# Altium footprint library SB0037A.PcbLib: 74 footprints (part 2 of 5)
Each footprint in its own frame and in the unit in brackets; x right, y up, seen from the top. Pads: shape width x height; smd on the part's side, far side on the other; paste and mask are expansions set on the pad; w line width, h text height; cw(c..) or ccw(c..) is an arc to the next point about the centre after c.
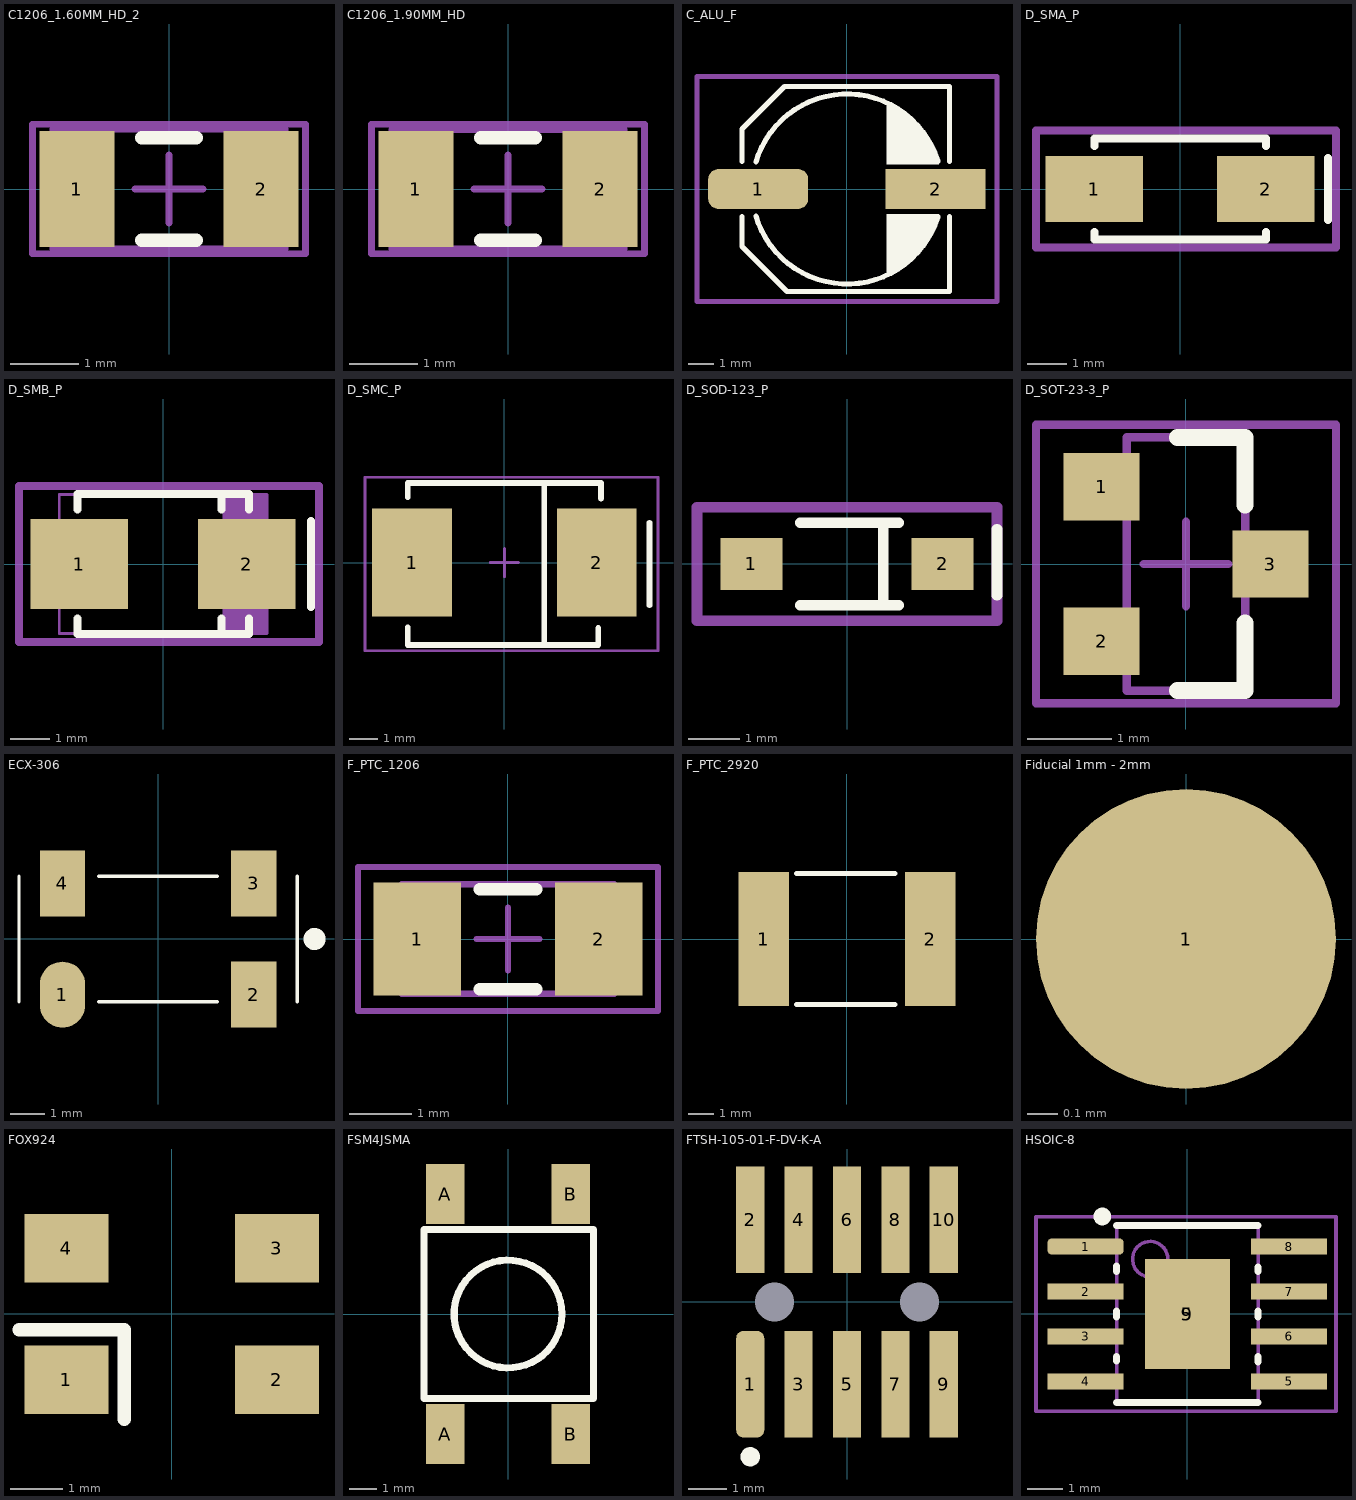
[diagram p1: the footprints below, top view; thin cyan lines are the x and y axes]

## C1206_1.60MM_HD_2 [mm]
pads (2):
  rect 1.1x1.7 smd: 1(-1.35,0) 2(1.35,0)
Top Overlay:
  lines w0.2: -0.4,-0.75 0.4,-0.75 ; -0.4,0.75 0.4,0.75
Mechanical 13:
  lines w0.1: -1.7,-0.875 1.7,-0.875 1.7,0.875 -1.7,0.875 -1.7,-0.875
Mechanical 15:
  lines w0.1: -0.5,0 0.5,0 ; 0,-0.5 0,0.5 ; -2,-0.95 2,-0.95 2,0.95 -2,0.95 -2,-0.95
3D body "1206_1.60mm.STEP": height 1.6, standoff 0, extent -1.6,-0.8 1.6,0.8

## C1206_1.90MM_HD [mm] "Capacitor - 1206 - High Density"
height 1.9
pads (2):
  rect 1.1x1.7 smd: 1(-1.35,0) 2(1.35,0)
Top Overlay:
  lines w0.2: -0.4,-0.75 0.4,-0.75 ; -0.4,0.75 0.4,0.75
Mechanical 13:
  lines w0.1: -1.7,-0.875 1.7,-0.875 1.7,0.875 -1.7,0.875 -1.7,-0.875
Mechanical 15:
  lines w0.1: -0.5,0 0.5,0 ; 0,-0.5 0,0.5 ; -2,-0.95 2,-0.95 2,0.95 -2,0.95 -2,-0.95
3D body "1206_1.90mm.STEP": height 1.9, standoff 0, extent -1.6,-0.8 1.6,0.8

## C_ALU_F [mm] "8.0mm x 10.2mm"
height 10.2
pads (2):
  rrect50% 4x1.6 smd: 1(-3.55,0)
  rect 4x1.6 smd: 2(3.55,0)
Top Overlay:
  region: 3.663,-1.017 3.663,-1 1.6,-1 1.6,-3.4 2.2,-3.1 2.7,-2.7 3.1,-2.2 3.5,-1.5
  region: 3.663,1.017 3.663,1 1.6,1 1.6,3.4 2.2,3.1 2.7,2.7 3.1,2.2 3.5,1.5
  lines w0.203: -4.2,-1.1 -4.2,-2.3 -2.4,-4.1 -1.8,-4.1 4.1,-4.1 4.1,-1.1 ; -4.2,1.1 -4.2,2.4 -2.5,4.1 -1.8,4.1 4.1,4.1 4.1,1.1 ; -3.644,-1.083 ccw(c0,0) 3.635,-1.111 ; -3.644,1.083 cw(c0,0) 3.635,1.111
Mechanical 15:
  lines w0.203: -6,-4.5 -0.5,-4.5 6,-4.5 6,4.5 -6,4.5 -6,-4.5
3D body "Cap_SMT_Aluminum_F.STEP": height 10.22, standoff 0, extent -5,-4.15 4.9,4.15

## D_SMA_P [mm] "SMA Diode - Polarized"
height 2.3
pads (2):
  rect 2.5x1.7 smd: 1(-2.2,0) 2(2.2,0)
Top Overlay:
  lines w0.203: -2.2,-1.1 -2.2,-1.3 0,-1.3 2.2,-1.3 2.2,-1.1 ; -2.2,1.1 -2.2,1.3 2.2,1.3 2.2,1.1 ; 3.8,-0.8 3.8,0.8
Mechanical 15:
  lines w0.203: -3.7,-1.5 -3.7,1.5 4,1.5 4,-1.5 0,-1.5 -3.7,-1.5
3D body "DO-214AC SMA.STEP": height 2.35, standoff -0.05, extent -2.6,-1.3 2.6,1.3

## D_SMB_P [mm] "SMB Diode - Polarized"
height 2.5
pads (2):
  rect 2.5x2.3 smd: 1(-2.15,0) 2(2.15,0)
Top Overlay:
  lines w0.203: -2.2,-1.4 -2.2,-1.8 2.2,-1.8 2.2,-1.4 ; -2.2,1.4 -2.2,1.8 2.2,1.8 2.2,1.4 ; 1.5,-1.8 1.5,-1.4 ; 1.5,1.4 1.5,1.8 ; 3.8,-1.1 3.8,1.1
Mechanical 13:
  rectangle: 1.523,-1.778 2.666,1.778
  lines w0.076: -2.667,-1.778 2.667,-1.778 2.667,1.778 -2.667,1.778 -2.667,-1.778
Mechanical 15:
  lines w0.203: -3.7,-2 -3.7,2 4,2 4,-2 0.5,-2 -3.7,-2
3D body "DO-214AA SMB.STEP": height 2.3, standoff 0, extent -2.7,-1.8 2.7,1.8

## D_SMC_P [mm] "Diode SMC - Polarized"
height 2.62
pads (2):
  rect 2.8x3.8 smd: 1(-3.25,0) 2(3.25,0)
Top Overlay:
  lines w0.2: 1.4,-2.9 1.4,2.8
  lines w0.203: -3.4,-2.275 -3.4,-2.9 3.3,-2.9 3.3,-2.3 ; -3.4,2.3 -3.4,2.8 3.4,2.8 3.4,2.25 ; 5.1,-1.5 5.1,1.4
Mechanical 15:
  lines w0.1: -0.5,0 0.5,0 ; 0,-0.5 0,0.5 ; -4.9,-3.1 5.4,-3.1 5.4,3 -4.9,3 -4.9,-3.1
3D body "DO-214AB SMC.STEP": height 2.3, standoff 0, extent -3.975,-3 3.975,2.9

## D_SOD-123_P [mm] "SOD-123 Diode - Polarized"
height 1.35
pads (2):
  rect 1.2x1 smd: 1(-1.85,0) 2(1.85,0)
Top Overlay:
  lines w0.203: -0.9,-0.8 1,-0.8 ; -0.9,0.8 1,0.8 ; 0.7,-0.8 0.7,0.8 ; 2.9,-0.6 2.9,0.67
Mechanical 15:
  lines w0.203: -2.9,-1.1 -2.9,1.1 2.9,1.1 2.9,-1.1 0,-1.1 -2.9,-1.1
3D body "SOD-123.step": height 1.43, standoff -0.02, extent -1.95,-0.85 1.9,0.85

## D_SOT-23-3_P [mm] "Diode - SOT-23-3 - Polarized"
height 1.2
pads (3):
  rect 0.9x0.8 smd: 1(-1,0.915) 2(-1,-0.915) 3(1,0)
Top Overlay:
  lines w0.2: -0.1,-1.5 0.7,-1.5 0.7,-0.7 ; -0.1,1.5 0.7,1.5 0.7,0.7
Mechanical 13:
  lines w0.1: -0.7,-1.5 0.7,-1.5 0.7,1.5 -0.7,1.5 -0.7,-1.5
Mechanical 15:
  lines w0.1: -0.5,0 0.5,0 ; 0,-0.5 0,0.5 ; -1.778,-1.651 1.778,-1.651 1.778,1.651 -1.778,1.651 -1.778,-1.651
3D body "SOT-23.STEP": height 0.98, standoff -0.01, extent -1.2,-1.448 1.22,1.448

## ECX-306 [mm]
height 15.62
pads (4):
  oval 1.3x1.9 smd: 1(-2.75,-1.6)
  rect 1.3x1.9 smd: 2(2.75,-1.6) 3(2.75,1.6) 4(-2.75,1.6)
Top Overlay:
  circle w0.381: c4.5,0 r0.127
  lines w0.1: -4,-1.8 -4,1.8 ; -1.7,-1.8 1.7,-1.8 ; -1.7,1.8 1.7,1.8 ; 4,-1.8 4,1.8
3D body "ecx-306x.stp": height 2.65, standoff 0, extent -3.992,-1.975 3.992,2.025

## F_PTC_1206 [mm] "Fuse PTC - 1206"
height 0.6
pads (2):
  rect 1.4x1.8 smd: 1(-1.45,0) 2(1.45,0)
Top Overlay:
  lines w0.2: -0.45,-0.8 0.45,-0.8 ; -0.45,0.8 0.45,0.8
Mechanical 13:
  lines w0.1: -1.7,-0.875 -1.7,0.875 1.7,0.875 1.7,-0.875 -1.7,-0.875
Mechanical 15:
  lines w0.1: -0.5,0 0.5,0 ; 0,-0.5 0,0.5 ; -2.4,-1.15 -2.4,1.15 2.4,1.15 2.4,-1.15 -2.4,-1.15
3D body: height 0.58, standoff 0, extent -1.1,-0.8 1.1,0.8
3D body: height 0.6, standoff 0, extent -1.6,-0.8 -1.1,0.8
3D body: height 0.6, standoff 0, extent 1.1,-0.8 1.6,0.8

## F_PTC_2920 [mm] "LittleFuse 2920 SMT Fuse"
height 0.762
pads (2):
  rect 2x5.3 smd: 1(-3.3,0) 2(3.3,0)
Top Overlay:
  lines w0.203: -2,-2.6 1.9,-2.6 ; -2,2.6 1.9,2.6
3D body: height 1.25, standoff 0, extent -1.5,-2.6 1.5,2.6
3D body: height 1.25, standoff 0, extent 1.5,-2.6 4,2.6
3D body: height 1.25, standoff 0, extent -4,-2.6 -1.5,2.6

## Fiducial 1mm - 2mm [mm] "1mm Pad 2mm Opening"
height 1.6
pads (1):
  round 1 smd paste-10 mask+0.5: 1(0,0)

## FOX924 [mm] "Fox 924 Series Oscillator"
height 1
pads (4):
  rect 1.6x1.3 smd: 1(-2,-1.25) 2(2,-1.25) 3(2,1.25) 4(-2,1.25)
Top Overlay:
  lines w0.254: -2.9,-0.3 -0.906,-0.3 ; -0.9,-2 -0.9,-0.3
3D body "ABM3B.STEP": height 1.1, standoff 0, extent -2.5,-1.6 2.5,1.6

## FSM4JSMA [mil] "SWITCH TACTILE SPST-NO 0.05A 12V"
height 293.31
pads (4):
  rect 55x85 smd: A(-89,-170) A(-89,170) B(89,-170) B(89,170)
Top Overlay:
  circle w10: c0,0 r76.32
  lines w10: -119,-120 -119,120 121,120 121,-120 -119,-120
3D body "FSM4JSMA.step": height 200.22, standoff 0.22, extent -118.11,-197.85 118.11,195.85

## FTSH-105-01-F-DV-K-A [mil] "Samtec FTSH-105-01-F-DV-K-A SMT Connector"
height 235.04
pads (12):
  rrect50% 29x110 smd: 1(-100,-85)
  rect 29x110 smd: 2(-100,85) 3(-50,-85) 4(-50,85) 5(0,-85) 6(0,85) 7(50,-85) 8(50,85) 9(100,-85) 10(100,85)
  round 5 hole 40 unplated mask+20: A(-75,0) A(75,0)
Top Overlay:
  circle w10: c-100,-160 r5
3D body "FTSH-105-01-X-DV-K-A.step": height 241, standoff -34, extent -125,-115.01 125,114.99

## HSOIC-8 [mm] "HSOIC, 8-Leads with Heat Pad, Body 5.0x4.0mm (max), Pitch 1.27mm, IPC Medium Density"
height 1.75
pads (10):
  rrect50% 2.15x0.45 smd: 1(-2.875,1.905)
  rect 2.15x0.45 smd: 2(-2.875,0.635) 3(-2.875,-0.635) 4(-2.875,-1.905) 5(2.875,-1.905) 6(2.875,-0.635) 7(2.875,0.635) 8(2.875,1.905)
  rect 2.13x3 on Top Solder paste+0 mask+0: 5(0,0)
  rect 2.4x3.1 smd paste+0 mask+0: 9(0,0)
Top Overlay:
  circle w0.25: c-2.4,2.755 r0.125
  lines w0.2: -2,2.5 0.9,2.5 ; -0.9,-2.5 0.9,-2.5
  lines w0.203: -2,-2.5 -0.9,-2.5 ; -2,-1.325 -2,-1.2 ; -2,-0.075 -2,0.075 ; -2,1.2 -2,1.35 ; 0.9,-2.5 2,-2.5 ; 0.9,2.5 2,2.5 ; 2,-1.35 2,-1.2 ; 2,-0.075 2,0.075 ; 2,1.2 2,1.325
Top Courtyard:
  lines w0.1: -0.5,0 0.5,0 ; 0,-0.5 0,0.5 ; -4.275,-2.75 4.2,-2.75 4.2,2.75 -4.275,2.75 -4.275,-2.75
Mechanical 13:
  circle w0.1: c-1.05,1.55 r0.5
  lines w0.1: -2,-2.5 2,-2.5 2,2.5 -2,2.5 -2,-2.5
3D body "User Library-SOIC-8.STEP": height 1.75, standoff 0, extent -3.012,-2.5 3,2.5